# Altium footprint library FootPrintLib_11.PcbLib: 376 footprints (part 2 of 24)
Each footprint in its own frame and in the unit in brackets; x right, y up, seen from the top. Pads: shape width x height; smd on the part's side, far side on the other; paste and mask are expansions set on the pad; w line width, h text height; cw(c..) or ccw(c..) is an arc to the next point about the centre after c.
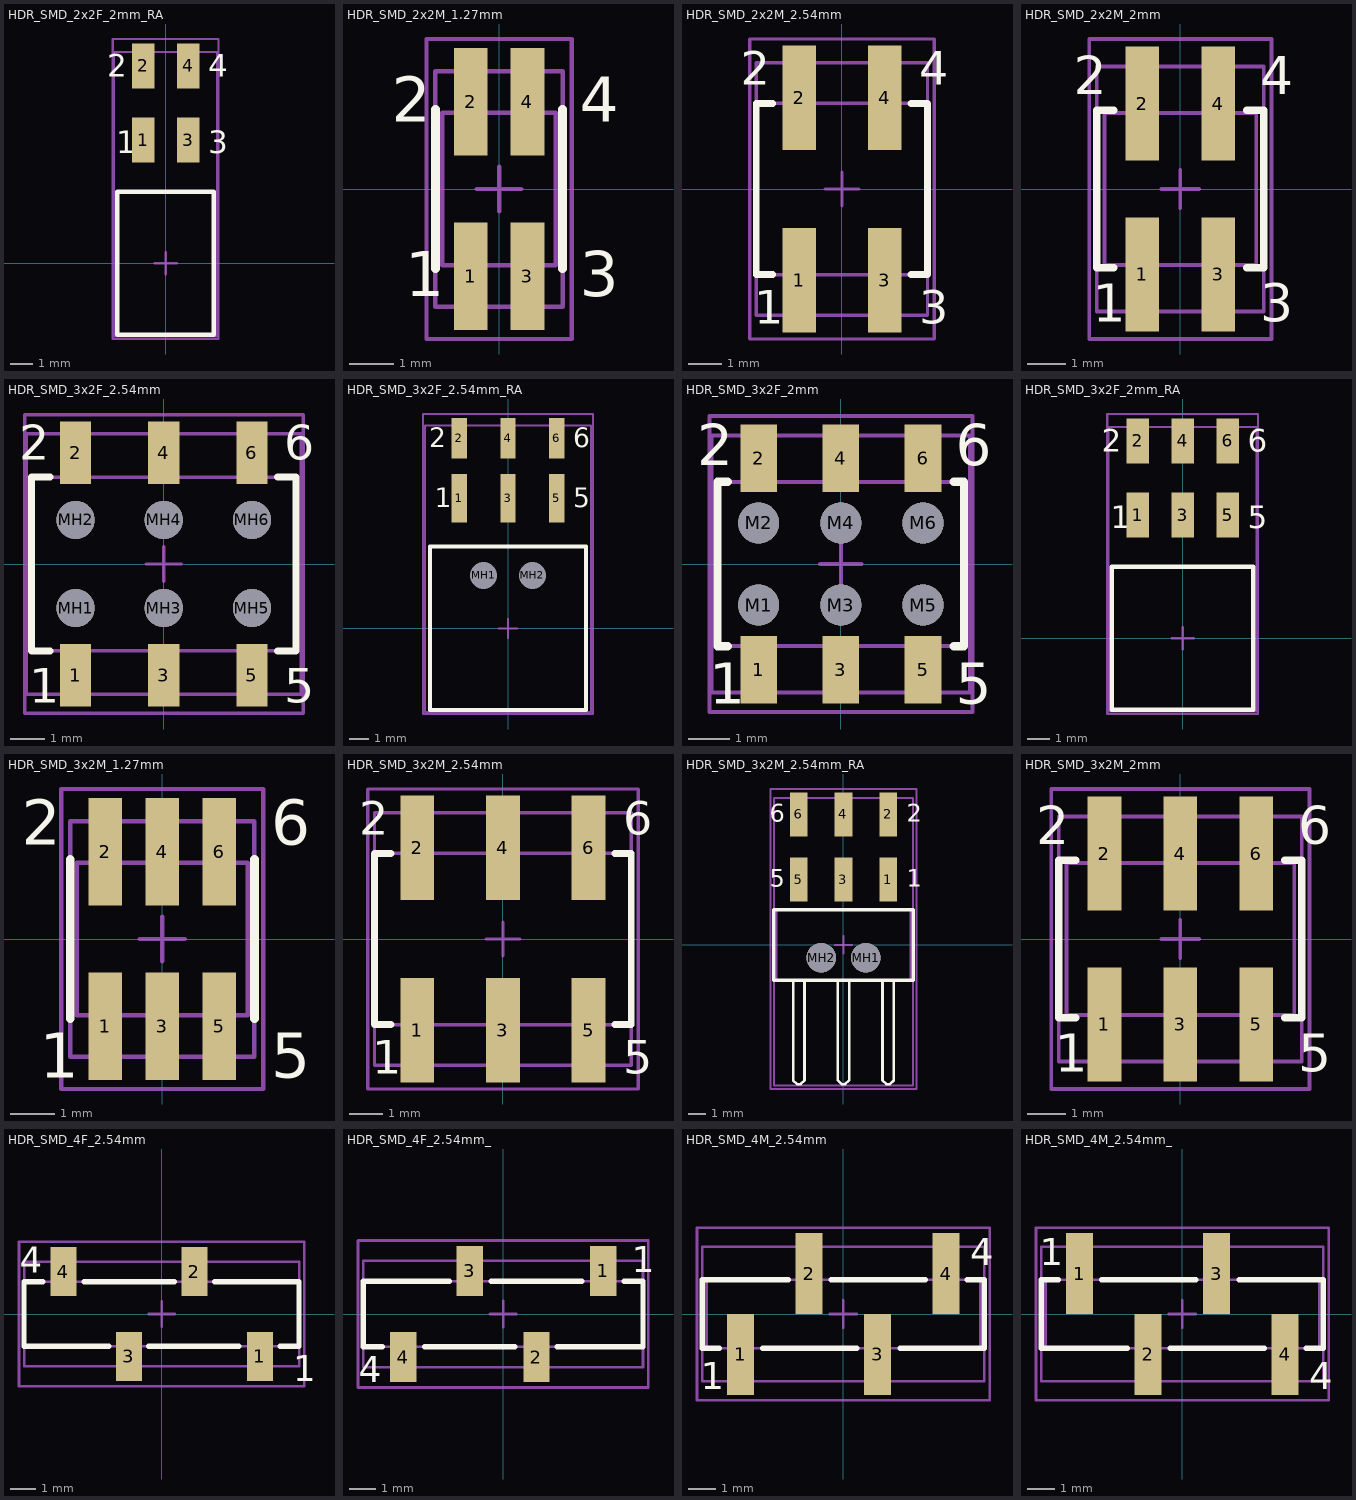
[diagram p1: the footprints below, top view; thin cyan lines are the x and y axes]

## HDR_SMD_2x2F_2mm_RA [mm] "Socket Header, Pitch 2.00 mm, SMT, Angled, dual row, 4p"
height 4.15
pads (4):
  rect 1x2 smd: 1(-1,5.475) 2(-1,8.775) 3(1,5.475) 4(1,8.775)
Top Overlay:
  lines w0.2: -2.15,-3.175 2.15,-3.175 2.15,3.175 -2.15,3.175 -2.15,-3.175
  text "2" at -2.6,8.3 h1
  text "4" at 1.9,8.3 h1
  text "3" at 1.9,4.9 h1
  text "1" at -2.2,4.9 h1
Mechanical 11:
  lines w0.1: -2.15,-3.175 -2.15,3.175 2.15,3.175 2.15,-3.175 -2.15,-3.175
Mechanical 13:
  lines w0.1: -2.3,-3.25 2.3,-3.25 2.3,9.4 -2.3,9.4 -2.3,-3.25
Mechanical 15:
  lines w0.1: -0.5,0 0.5,0 ; 0,-0.5 0,0.5 ; -2.35,-3.375 -2.35,9.975 2.35,9.975 2.35,-3.375 -2.35,-3.375
3D body "621104284621.stp": height 4.05, standoff 0.05, extent -2.15,-3.175 2.15,9.275

## HDR_SMD_2x2M_1.27mm [mm] "Pin Header, pitch 1.27 mm, SMD, Vertical, dual row, 4p"
height 6.55
pads (4):
  rect 0.75x2.4 smd: 1(-0.635,-1.95) 2(-0.635,1.95) 3(0.635,-1.95) 4(0.635,1.95)
Top Overlay:
  lines w0.2: -1.42,-1.775 -1.42,1.775 ; 1.42,-1.775 1.42,1.775
  text "4" at 1.8,1.5 h1
  text "3" at 1.8,-2.4 h1
  text "2" at -2.4,1.5 h1
  text "1" at -2.1,-2.4 h1
Mechanical 11:
  lines w0.1: -1.27,-1.7 1.27,-1.7 1.27,1.7 -1.27,1.7 -1.27,-1.7
Mechanical 13:
  lines w0.1: -1.42,-2.625 -1.42,2.625 1.42,2.625 1.42,-2.625 -1.42,-2.625
Mechanical 15:
  lines w0.1: -0.5,0 0.5,0 ; 0,-0.5 0,0.5 ; -1.62,-3.35 1.62,-3.35 1.62,3.35 -1.62,3.35 -1.62,-3.35
3D body "62100421021.stp": height 5.9, standoff 0, extent -1.27,-2.55 1.27,2.55

## HDR_SMD_2x2M_2.54mm [mm] "Pin Header, pitch 2.54 mm, SMD, Vertical, dual row, 4p"
height 9.6
pads (4):
  rect 1x3.1 smd: 1(-1.27,-2.7) 2(-1.27,2.7) 3(1.27,-2.7) 4(1.27,2.7)
Top Overlay:
  lines w0.2: -2.05,-2.54 -2.54,-2.54 -2.54,2.54 -2.05,2.54 ; 2.05,-2.54 2.54,-2.54 2.54,2.54 2.05,2.54
  text "2" at -3,3.1 h1
  text "4" at 2.3,3.1 h1
  text "3" at 2.3,-4 h1
  text "1" at -2.6,-4 h1
Mechanical 11:
  lines w0.1: -2.54,-2.54 -2.54,2.54 2.54,2.54 2.54,-2.54 -2.54,-2.54
Mechanical 13:
  lines w0.1: -2.54,-3.75 2.54,-3.75 2.54,3.75 -2.54,3.75 -2.54,-3.75
Mechanical 15:
  lines w0.1: -0.5,0 0.5,0 ; 0,-0.5 0,0.5 ; -2.74,-4.45 2.74,-4.45 2.74,4.45 -2.74,4.45 -2.74,-4.45
3D body "61030421121.stp": height 9.62, standoff 0.02, extent -2.54,-3.75 2.54,3.75

## HDR_SMD_2x2M_2mm [mm] "Pin Header, pitch 2.00 mm, SMD, Vertical, dual row, 4p"
height 6.8
pads (4):
  rect 0.89x3 smd: 1(-1,-2.25) 2(-1,2.25) 3(1,-2.25) 4(1,2.25)
Top Overlay:
  lines w0.2: -1.75,-2.075 -2.2,-2.075 -2.2,2.075 -1.75,2.075 ; 1.75,-2.075 2.2,-2.075 2.2,2.075 1.75,2.075
  text "4" at 2.1,2.5 h1
  text "2" at -2.8,2.5 h1
  text "3" at 2.1,-3.5 h1
  text "1" at -2.3,-3.5 h1
Mechanical 11:
  lines w0.1: -2,-2 -2,2 2,2 2,-2 -2,-2
Mechanical 13:
  lines w0.1: -2.2,-3.225 2.2,-3.225 2.2,3.225 -2.2,3.225 -2.2,-3.225
Mechanical 15:
  lines w0.1: -0.5,0 0.5,0 ; 0,-0.5 0,0.5 ; -2.4,-3.95 2.4,-3.95 2.4,3.95 -2.4,3.95 -2.4,-3.95
3D body "62100421921.stp": height 6.7, standoff 0, extent -2,-3.1 2,3.1

## HDR_SMD_3x2F_2.54mm [mm] "Socket Header, Pitch 2.54 mm, SMT, Vertical, dual row, 6p"
height 3.7
pads (12):
  rect 0.9x1.8 smd: 1(-2.54,-3.2) 2(-2.54,3.2) 3(0,-3.2) 4(0,3.2) 5(2.54,-3.2) 6(2.54,3.2)
  round 1.1 hole 1.1 unplated: MH1(-2.54,-1.27) MH2(-2.54,1.27) MH3(0,-1.27) MH4(0,1.27) MH5(2.54,-1.27) MH6(2.54,1.27)
Top Overlay:
  lines w0.2: -3.27,-2.5 -3.81,-2.5 -3.81,2.5 -3.27,2.5 ; 3.27,-2.5 3.81,-2.5 3.81,2.5 3.27,2.5
  text "5" at 3.47,-4 h1
  text "6" at 3.47,3 h1
  text "2" at -4.17,3 h1
  text "1" at -3.87,-4 h1
Mechanical 11:
  lines w0.1: -3.81,-2.5 3.81,-2.5 3.81,2.5 -3.81,2.5 -3.81,-2.5
Mechanical 13:
  lines w0.1: -3.96,-3.75 3.96,-3.75 3.96,3.75 -3.96,3.75 -3.96,-3.75
Mechanical 15:
  lines w0.1: -0.5,0 0.5,0 ; 0,-0.5 0,0.5 ; -4.01,-4.3 4.01,-4.3 4.01,4.3 -4.01,4.3 -4.01,-4.3
3D body "610006243021.stp": height 3.7, standoff 0, extent -3.81,-3.603 3.81,3.603

## HDR_SMD_3x2F_2.54mm_RA [mm] "Socket Header, Pitch 2.54 mm, SMT, Angled, dual row, 6p"
height 5.2
pads (8):
  rect 0.8x2.5 smd: 1(-2.54,6.76) 3(0,6.76) 5(2.54,6.76)
  rect 0.8x2.1 smd: 2(-2.54,9.89) 4(0,9.89) 6(2.54,9.89)
  round 1.3 hole 1.4 unplated: MH1(-1.27,2.75) MH2(1.27,2.75)
Top Overlay:
  lines w0.2: -4.06,-4.25 4.06,-4.25 4.06,4.25 -4.06,4.25 -4.06,-4.25
  text "1" at -3.8,6.3 h1
  text "2" at -4.1,9.4 h1
  text "5" at 3.4,6.3 h1
  text "6" at 3.4,9.4 h1
Mechanical 11:
  lines w0.1: -4.06,-4.25 4.06,-4.25 4.06,4.25 -4.06,4.25 -4.06,-4.25
Mechanical 13:
  lines w0.1: -4.31,-4.35 4.31,-4.35 4.31,10.54 -4.31,10.54 -4.31,-4.35
Mechanical 15:
  lines w0.1: -0.5,0 0.5,0 ; 0,-0.5 0,0.5 ; -4.41,-4.45 4.41,-4.45 4.41,11.14 -4.41,11.14 -4.41,-4.45
3D body "610106249221.stp": height 5.03, standoff -1.27, extent -4.06,-4.25 4.06,10.44

## HDR_SMD_3x2F_2mm [mm] "Socket Header, Pitch 2.00 mm, SMT, Vertical, dual row, 6p"
height 2.35
pads (12):
  rect 0.89x1.65 smd: 1(-2,-2.575) 2(-2,2.575) 3(0,-2.575) 4(0,2.575) 5(2,-2.575) 6(2,2.575)
  round 1 hole 1 unplated: M1(-2,-1) M2(-2,1) M3(0,-1) M4(0,1) M5(2,-1) M6(2,1)
Top Overlay:
  lines w0.2: -2.75,-2 -3,-2 -3,2 -2.75,2 ; 2.75,-2 3,-2 3,2 2.75,2
  text "6" at 2.8,2.4 h1
  text "5" at 2.8,-3.4 h1
  text "2" at -3.5,2.4 h1
  text "1" at -3.2,-3.4 h1
Mechanical 11:
  lines w0.1: -3,-2 -3,2 3,2 3,-2 -3,-2
Mechanical 13:
  lines w0.1: -3.15,-3.125 -3.15,3.125 3.15,3.125 3.15,-3.125 -3.15,-3.125
Mechanical 15:
  lines w0.1: -0.5,0 0.5,0 ; 0,-0.5 0,0.5 ; -3.2,-3.6 -3.2,3.6 3.2,3.6 3.2,-3.6 -3.2,-3.6
3D body "62100621821.stp": height 2.1, standoff 0, extent -3,-3 3,3

## HDR_SMD_3x2F_2mm_RA [mm] "Socket Header, Pitch 2.00 mm, SMT, Angled, dual row, 6p"
height 4.15
pads (6):
  rect 1x2 smd: 1(-2,5.475) 2(-2,8.775) 3(0,5.475) 4(0,8.775) 5(2,5.475) 6(2,8.775)
Top Overlay:
  lines w0.2: -3.15,-3.175 -3.15,3.175 3.15,3.175 3.15,-3.175 -3.15,-3.175
  text "5" at 2.9,4.9 h1
  text "6" at 2.9,8.3 h1
  text "1" at -3.2,4.9 h1
  text "2" at -3.6,8.3 h1
Mechanical 11:
  lines w0.1: -3.15,-3.175 3.15,-3.175 3.15,3.175 -3.15,3.175 -3.15,-3.175
Mechanical 13:
  lines w0.1: -3.3,-3.25 -3.3,9.4 3.3,9.4 3.3,-3.25 -3.3,-3.25
Mechanical 15:
  lines w0.1: -0.5,0 0.5,0 ; 0,-0.5 0,0.5 ; -3.35,-3.375 3.35,-3.375 3.35,9.975 -3.35,9.975 -3.35,-3.375
3D body "621106284621.stp": height 4.05, standoff 0.05, extent -3.15,-3.175 3.15,9.275

## HDR_SMD_3x2M_1.27mm [mm] "Pin Header, pitch 1.27 mm, SMD, Vertical, dual row, 6p"
height 6.1
pads (6):
  rect 0.75x2.4 smd: 1(-1.27,-1.95) 2(-1.27,1.95) 3(0,-1.95) 4(0,1.95) 5(1.27,-1.95) 6(1.27,1.95)
Top Overlay:
  lines w0.2: -2.055,-1.775 -2.055,1.775 ; 2.055,-1.775 2.055,1.775
  text "1" at -2.735,-3.1 h1
  text "2" at -3.135,2.1 h1
  text "5" at 2.435,-3.1 h1
  text "6" at 2.435,2.1 h1
Mechanical 11:
  lines w0.1: -1.905,-1.7 -1.905,1.7 1.905,1.7 1.905,-1.7 -1.905,-1.7
Mechanical 13:
  lines w0.1: -2.055,-2.625 2.055,-2.625 2.055,2.625 -2.055,2.625 -2.055,-2.625
Mechanical 15:
  lines w0.1: -0.5,0 0.5,0 ; 0,-0.5 0,0.5 ; -2.255,-3.35 2.255,-3.35 2.255,3.35 -2.255,3.35 -2.255,-3.35
3D body "62130621021.stp": height 5.9, standoff 0, extent -1.905,-2.55 1.905,2.55

## HDR_SMD_3x2M_2.54mm [mm] "Pin Header, pitch 2.54 mm, SMD, Vertical, dual row, 6p"
height 9.6
pads (6):
  rect 1x3.1 smd: 1(-2.54,-2.7) 2(-2.54,2.7) 3(0,-2.7) 4(0,2.7) 5(2.54,-2.7) 6(2.54,2.7)
Top Overlay:
  lines w0.2: -3.32,-2.54 -3.81,-2.54 -3.81,2.54 -3.32,2.54 ; 3.32,-2.54 3.81,-2.54 3.81,2.54 3.32,2.54
  text "6" at 3.57,3.1 h1
  text "5" at 3.57,-4 h1
  text "1" at -3.87,-4 h1
  text "2" at -4.27,3.1 h1
Mechanical 11:
  lines w0.1: -3.81,-2.54 3.81,-2.54 3.81,2.54 -3.81,2.54 -3.81,-2.54
Mechanical 13:
  lines w0.1: -3.81,-3.75 -3.81,3.75 3.81,3.75 3.81,-3.75 -3.81,-3.75
Mechanical 15:
  lines w0.1: -0.5,0 0.5,0 ; 0,-0.5 0,0.5 ; -4.01,-4.45 -4.01,4.45 4.01,4.45 4.01,-4.45 -4.01,-4.45
3D body "61000621121.stp": height 9.62, standoff 0.02, extent -3.81,-3.75 3.81,3.75

## HDR_SMD_3x2M_2.54mm_RA [mm] "Pin Header, pitch 2.54 mm, SMD, Angled, dual row, 6p"
height 5.08
pads (8):
  rect 1x2.5 smd: 1(2.54,3.72) 2(2.54,7.42) 3(0,3.72) 4(0,7.42) 5(-2.54,3.72) 6(-2.54,7.42)
  round 1.68 hole 1.68 unplated: MH1(1.27,-0.73) MH2(-1.27,-0.73)
Top Overlay:
  lines w0.15: -2.86,-2 -2.86,-7.3 -2.86,-7.58 -2.86,-7.705 -2.64,-7.925 -2.44,-7.925 -2.22,-7.705 -2.22,-7.58 -2.22,-7.3 -2.22,-2 ; -0.32,-2 -0.32,-7.3 -0.32,-7.58 -0.32,-7.705 -0.1,-7.925 0.1,-7.925 0.32,-7.705 0.32,-7.58 0.32,-7.3 0.32,-2 ; 2.22,-2 2.22,-7.3 2.22,-7.58 2.22,-7.705 2.44,-7.925 2.64,-7.925 2.86,-7.705 2.86,-7.58 2.86,-7.3 2.86,-2
  lines w0.2: -3.96,-2 3.96,-2 3.96,2 -3.96,2 -3.96,-2
  text "1" at 3.6,3.3 h1
  text "2" at 3.6,7 h1
  text "5" at -4.2,3.3 h1
  text "6" at -4.2,7 h1
Mechanical 11:
  lines w0.1: -3.81,-2 3.81,-2 3.81,2 -3.81,2 -3.81,-2
Mechanical 13:
  lines w0.1: -3.96,-8 3.96,-8 3.96,8.36 -3.96,8.36 -3.96,-8
Mechanical 15:
  lines w0.1: -0.5,0 0.5,0 ; 0,-0.5 0,0.5 ; -4.16,-8.2 -4.16,8.87 4.16,8.87 4.16,-8.2 -4.16,-8.2
3D body "610106249121.stp": height 5.1, standoff -1.38, extent -3.81,-8 3.81,8.16

## HDR_SMD_3x2M_2mm [mm] "Pin Header, pitch 2.00 mm, SMD, Vertical, dual row, 6p"
height 6.8
pads (6):
  rect 0.89x3 smd: 1(-2,-2.25) 2(-2,2.25) 3(0,-2.25) 4(0,2.25) 5(2,-2.25) 6(2,2.25)
Top Overlay:
  lines w0.2: -2.75,-2.075 -3.2,-2.075 -3.2,2.075 -2.75,2.075 ; 2.75,-2.075 3.2,-2.075 3.2,2.075 2.75,2.075
  text "5" at 3.1,-3.5 h1
  text "6" at 3.1,2.5 h1
  text "2" at -3.8,2.5 h1
  text "1" at -3.3,-3.5 h1
Mechanical 11:
  lines w0.1: -3,-2 -3,2 3,2 3,-2 -3,-2
Mechanical 13:
  lines w0.1: -3.2,-3.225 3.2,-3.225 3.2,3.225 -3.2,3.225 -3.2,-3.225
Mechanical 15:
  lines w0.1: -0.5,0 0.5,0 ; 0,-0.5 0,0.5 ; -3.4,-3.95 3.4,-3.95 3.4,3.95 -3.4,3.95 -3.4,-3.95
3D body "62100621921.stp": height 6.7, standoff 0, extent -3,-3.1 3,3.1

## HDR_SMD_4F_2.54mm [mm] "Socket Header, Pitch 2.54 mm, SMT, Vertical, single row, 4p"
height 7.5
pads (4):
  rect 1x1.91 smd: 1(3.81,-1.645) 2(1.27,1.645) 3(-1.27,-1.645) 4(-3.81,1.645)
Top Overlay:
  lines w0.2: -4.6,1.25 -5.33,1.25 -5.33,-1.25 -2.05,-1.25 ; -3,1.25 0.5,1.25 ; -0.5,-1.25 3,-1.25 ; 2.05,1.25 5.33,1.25 5.33,-1.25 4.6,-1.25
  text "1" at 5.1,-2.6 h1
  text "4" at -5.5,1.6 h1
Mechanical 11:
  lines w0.1: -5.33,-1.25 -5.33,1.25 5.33,1.25 5.33,-1.25 -5.33,-1.25
Mechanical 13:
  lines w0.1: -5.33,-2.025 -5.33,2.025 5.33,2.025 5.33,-2.025 -5.33,-2.025
Mechanical 15:
  lines w0.1: -0.5,0 0.5,0 ; 0,-0.5 0,0.5 ; -5.53,-2.8 -5.53,2.8 5.53,2.8 5.53,-2.8 -5.53,-2.8
3D body "61000411921.stp": height 7.5, standoff 0, extent -5.33,-2.025 5.33,2.025

## HDR_SMD_4F_2.54mm_ [mm] "Socket Header, Pitch 2.54 mm, SMT, Vertical, single row, 4p"
height 7.5
pads (4):
  rect 1x1.91 smd: 1(3.81,1.645) 2(1.27,-1.645) 3(-1.27,1.645) 4(-3.81,-1.645)
Top Overlay:
  lines w0.2: -4.6,-1.25 -5.33,-1.25 -5.33,1.25 -2.05,1.25 ; -3,-1.25 0.45,-1.25 ; -0.45,1.25 3,1.25 ; 2.05,-1.25 5.33,-1.25 5.33,1.25 4.6,1.25
  text "1" at 4.9,1.6 h1
  text "4" at -5.5,-2.6 h1
Mechanical 11:
  lines w0.1: -5.33,-1.25 -5.33,1.25 5.33,1.25 5.33,-1.25 -5.33,-1.25
Mechanical 13:
  lines w0.1: -5.33,-2.025 5.33,-2.025 5.33,2.025 -5.33,2.025 -5.33,-2.025
Mechanical 15:
  lines w0.1: -0.5,0 0.5,0 ; 0,-0.5 0,0.5 ; -5.53,-2.8 5.53,-2.8 5.53,2.8 -5.53,2.8 -5.53,-2.8
3D body "61000413321.stp": height 7.5, standoff 0, extent -5.33,-2.025 5.33,2.025

## HDR_SMD_4M_2.54mm [mm] "Pin Header, pitch 2.54 mm, SMD, Vertical, single row, 4p"
height 9.3
pads (4):
  rect 1x3 smd: 1(-3.81,-1.5) 2(-1.27,1.5) 3(1.27,-1.5) 4(3.81,1.5)
Top Overlay:
  lines w0.2: -4.6,-1.27 -5.23,-1.27 -5.23,1.27 -2.05,1.27 ; -3,-1.27 0.5,-1.27 ; -0.46,1.27 3.04,1.27 ; 2.1,-1.27 5.23,-1.27 5.23,1.27 4.6,1.27
  text "4" at 4.7,1.8 h1
  text "1" at -5.3,-2.8 h1
Mechanical 11:
  lines w0.1: -5.08,-1.27 -5.08,1.27 5.08,1.27 5.08,-1.27 -5.08,-1.27
Mechanical 13:
  lines w0.1: -5.23,-2.5 5.23,-2.5 5.23,2.5 -5.23,2.5 -5.23,-2.5
Mechanical 15:
  lines w0.1: -0.5,0 0.5,0 ; 0,-0.5 0,0.5 ; -5.43,-3.2 5.43,-3.2 5.43,3.2 -5.43,3.2 -5.43,-3.2
3D body "61000418221.stp": height 9.33, standoff 0, extent -5.08,-2.5 5.08,2.5

## HDR_SMD_4M_2.54mm_ [mm] "Pin Header, pitch 2.54 mm, SMD, Vertical, single row, 4p"
height 9.3
pads (4):
  rect 1x3 smd: 1(-3.81,1.5) 2(-1.27,-1.5) 3(1.27,1.5) 4(3.81,-1.5)
Top Overlay:
  lines w0.2: -4.6,1.27 -5.23,1.27 -5.23,-1.27 -2.05,-1.27 ; -3,1.27 0.5,1.27 ; -0.46,-1.27 3.04,-1.27 ; 2.1,1.27 5.23,1.27 5.23,-1.27 4.6,-1.27
  text "4" at 4.7,-2.8 h1
  text "1" at -5.3,1.8 h1
Mechanical 11:
  lines w0.1: -5.08,-1.27 -5.08,1.27 5.08,1.27 5.08,-1.27 -5.08,-1.27
Mechanical 13:
  lines w0.1: -5.23,-2.5 5.23,-2.5 5.23,2.5 -5.23,2.5 -5.23,-2.5
Mechanical 15:
  lines w0.1: -0.5,0 0.5,0 ; 0,-0.5 0,0.5 ; -5.43,-3.2 5.43,-3.2 5.43,3.2 -5.43,3.2 -5.43,-3.2
3D body "61000418321.stp": height 9.37, standoff 0.04, extent -5.08,-2.5 5.08,2.5